# Altium integrated library Resistor 0603 SMD.IntLib: 1 symbol
Pins are listed as number, name and electrical type; pins without a type are passive.

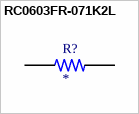
[diagram p0: symbol RC0603FR-071K2L]

## RC0603FR-071K2L
designator R?
1.2 kOhms Â±1% 0.1W, 1/10W Chip Resistor 0603 (1608 Metric) Moisture Resistant Thick Film; MF: Yageo; MP: RC0603FR-071K2L; SnapEDA_Link: https://www.snapeda.com/parts/RC0603FR-071K2L/Yageo/view-part/?ref=snap; Package: SMD-2 Yageo; Value: *; Check_prices: https://www.snapeda.com/parts/RC0603FR-071K2L/Yageo/view-part/?ref=eda
footprint RESC1607X60N
pins: 1, 2